# Altium schematic symbol library DRV2605LYZFR.SchLib: 1 symbol
Pins are listed as number, name and electrical type; pins without a type are passive.

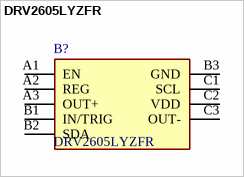
[diagram p0: symbol DRV2605LYZFR]

## DRV2605LYZFR
designator B?
Haptic Driver for ERM and LRA with Built-In Library and Smart Loop Architecture; Manufacturer_Name: Texas Instruments; Geometry.Height: 0.625mm; Mouser Part Number: 595-DRV2605LYZFR; Mouser Price/Stock: https://www.mouser.co.uk/ProductDetail/Texas-Instruments/DRV2605LYZFR?qs=7z%252BmIopC6%2FIPohzEGVWenA%3D%3D; Manufacturer_Part_Number: DRV2605LYZFR; Datasheet Link: http://www.ti.com/lit/gpn/drv2605l
footprint BGA9C50P3X3_144X144X62
pins: A1 EN, A2 REG, A3 OUT+, B1 IN/TRIG, B2 SDA, B3 GND, C1 SCL, C2 VDD, C3 OUT-